# Altium footprint library WS-RSTV.PcbLib: 70 footprints (part 1 of 5)
Each footprint in its own frame and in the unit in brackets; x right, y up, seen from the top. Pads: shape width x height; smd on the part's side, far side on the other; paste and mask are expansions set on the pad; w line width, h text height; cw(c..) or ccw(c..) is an arc to the next point about the centre after c.
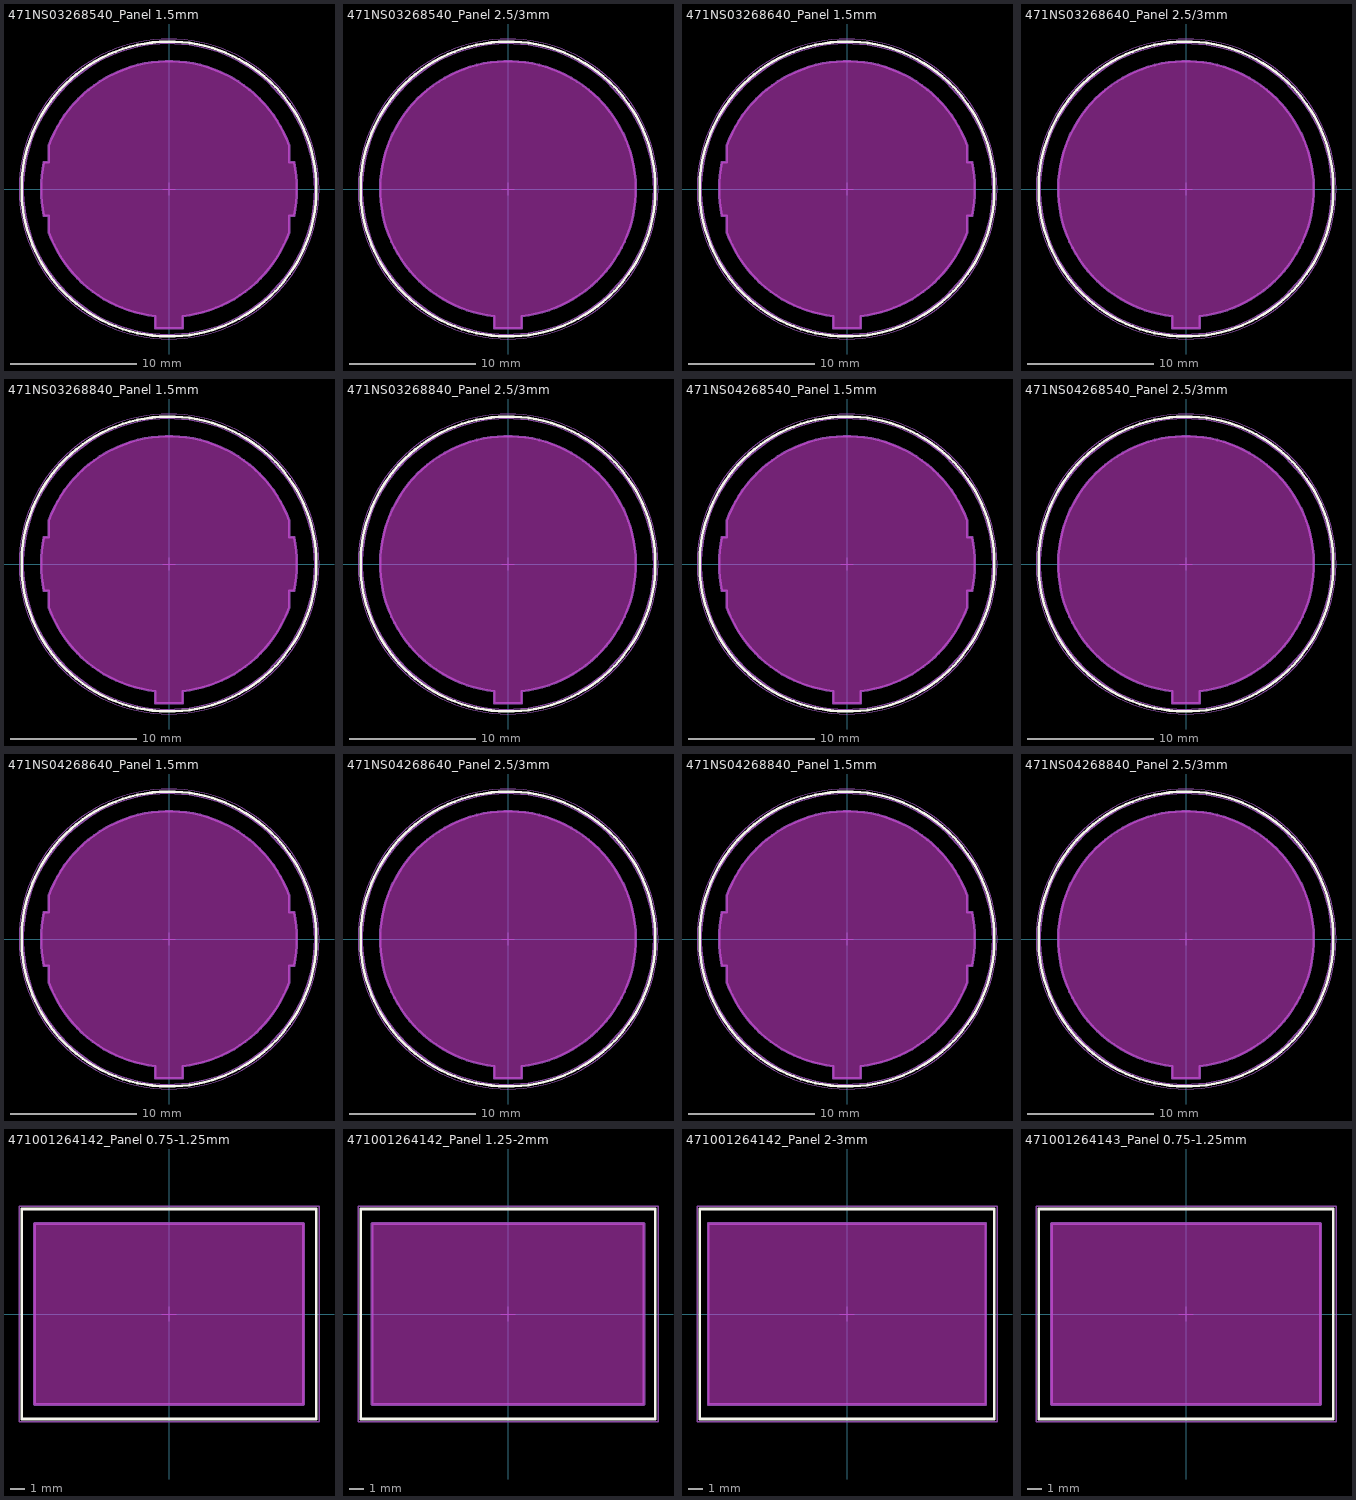
[diagram p0: the footprints below, top view; thin cyan lines are the x and y axes]

## 471NS03268540_Panel 1.5mm [mm]
height 5.5
Top Overlay:
  circle w0.2: c0,0 r11.65
Keep-Out Layer:
  board cut-out: -9.879,-2.1 -9.5,-2.1 -9.5,-3.43 -9.34,-3.872 -8.941,-4.722 -8.464,-5.531 -7.914,-6.293 -7.296,-7 -6.615,-7.647 -5.877,-8.228 -5.088,-8.737 -4.255,-9.172 -3.386,-9.527 -2.487,-9.8 -1.567,-9.989 -1.1,-10.04 -1.1,-11 1.1,-11 1.1,-10.04 1.567,-9.989 2.487,-9.8 3.386,-9.527 4.255,-9.172 5.088,-8.737 5.877,-8.228 6.615,-7.647 7.296,-7 7.914,-6.293 8.464,-5.531 8.941,-4.722 9.34,-3.872 9.5,-3.43 9.5,-2.1 9.879,-2.1 9.934,-1.841 10.017,-1.319 10.072,-0.793 10.1,-0.265 10.1,0.264 10.072,0.793 10.017,1.319 9.934,1.841 9.879,2.1 9.5,2.1 9.5,3.43 9.35,3.846 8.978,4.648 8.538,5.414 8.032,6.139 7.466,6.817 6.842,7.443 6.165,8.012 5.442,8.52 4.677,8.963 3.877,9.337 3.046,9.64 2.193,9.869 1.322,10.023 0.442,10.1 -0.442,10.1 -1.322,10.023 -2.193,9.869 -3.046,9.64 -3.876,9.337 -4.677,8.963 -5.442,8.52 -6.165,8.012 -6.842,7.443 -7.465,6.817 -8.032,6.139 -8.538,5.414 -8.978,4.648 -9.35,3.846 -9.5,3.43 -9.5,2.1 -9.879,2.1 -9.934,1.841 -10.017,1.319 -10.072,0.793 -10.1,0.264 -10.1,-0.265 -10.072,-0.793 -10.017,-1.319 -9.934,-1.841
Board Shape:
  lines w0.2: -9.879,2.1 ccw(c0,0) -9.879,-2.1 -9.5,-2.1 -9.5,-3.43 ccw(c0,0) -1.1,-10.04 -1.1,-11 1.1,-11 1.1,-10.04 ccw(c0,0) 9.5,-3.43 9.5,-2.1 9.879,-2.1 ccw(c0,0) 9.879,2.1 ; -9.879,2.1 -9.5,2.1 -9.5,3.43 cw(c0,0) 9.5,3.43 9.5,2.1 9.879,2.1
Assembly Notes:
  text "Panel Thicnkess 1.5mm" at -6,-13 h0.8
Top Component Outline:
  circle w0.1: c0,0 r11.5
Top Courtyard:
  circle w0.05: c0,0 r11.85
Top Component Center:
  lines w0.05: -0.5,0 0.5,0 ; 0,-0.5 0,0.5
Top Designator (Mech19):
  text ".Designator" at -7.498,-0.5 h1.5
3D body "471NS03268540.stp": height 5.7, standoff -22.6, extent -11.5,-11.497 11.5,11.497

## 471NS03268540_Panel 2.5/3mm [mm]
height 5.5
Top Overlay:
  circle w0.2: c0,0 r11.65
Keep-Out Layer:
  board cut-out: -1.1,-11 -1.1,-10.04 -1.576,-9.988 -2.514,-9.794 -3.429,-9.512 -4.314,-9.145 -5.16,-8.696 -5.96,-8.168 -6.706,-7.568 -7.392,-6.899 -8.012,-6.169 -8.559,-5.383 -9.03,-4.549 -9.42,-3.674 -9.726,-2.766 -9.944,-1.834 -10.073,-0.884 -10.111,0.073 -10.059,1.029 -9.916,1.976 -9.685,2.906 -9.366,3.809 -8.964,4.678 -8.481,5.505 -7.922,6.283 -7.292,7.005 -6.597,7.663 -5.842,8.253 -5.035,8.769 -4.182,9.206 -3.293,9.56 -2.373,9.829 -1.432,10.009 -0.479,10.1 0.479,10.1 1.432,10.009 2.373,9.829 3.293,9.56 4.182,9.206 5.035,8.769 5.842,8.253 6.597,7.663 7.292,7.005 7.922,6.283 8.481,5.505 8.964,4.678 9.366,3.809 9.685,2.906 9.916,1.976 10.059,1.029 10.111,0.073 10.073,-0.884 9.944,-1.834 9.726,-2.766 9.42,-3.674 9.03,-4.549 8.559,-5.383 8.012,-6.169 7.392,-6.899 6.706,-7.568 5.96,-8.168 5.16,-8.696 4.314,-9.145 3.43,-9.512 2.514,-9.794 1.576,-9.988 1.1,-10.04 1.1,-11
Board Shape:
  lines w0.2: -1.1,-11 1.1,-11 1.1,-10.04 ccw(c0,0) -1.1,-10.04 -1.1,-11
Assembly Notes:
  text "Panel Thicnkess 2.5/3mm" at -6,-13 h0.8
Top Component Outline:
  circle w0.1: c0,0 r11.5
Top Courtyard:
  circle w0.05: c0,0 r11.85
Top Component Center:
  lines w0.05: -0.5,0 0.5,0 ; 0,-0.5 0,0.5
Top Designator (Mech19):
  text ".Designator" at -7.498,-0.5 h1.5
3D body "471NS03268540.stp": height 5.7, standoff -22.6, extent -11.5,-11.497 11.5,11.497

## 471NS03268640_Panel 1.5mm [mm]
height 5.5
Top Overlay:
  circle w0.2: c0,0 r11.65
Keep-Out Layer:
  board cut-out: -9.879,-2.1 -9.5,-2.1 -9.5,-3.43 -9.34,-3.872 -8.941,-4.722 -8.464,-5.531 -7.914,-6.293 -7.296,-7 -6.615,-7.647 -5.877,-8.228 -5.088,-8.737 -4.255,-9.172 -3.386,-9.527 -2.487,-9.8 -1.567,-9.989 -1.1,-10.04 -1.1,-11 1.1,-11 1.1,-10.04 1.567,-9.989 2.487,-9.8 3.386,-9.527 4.255,-9.172 5.088,-8.737 5.877,-8.228 6.615,-7.647 7.296,-7 7.914,-6.293 8.464,-5.531 8.941,-4.722 9.34,-3.872 9.5,-3.43 9.5,-2.1 9.879,-2.1 9.934,-1.841 10.017,-1.319 10.072,-0.793 10.1,-0.265 10.1,0.264 10.072,0.793 10.017,1.319 9.934,1.841 9.879,2.1 9.5,2.1 9.5,3.43 9.35,3.846 8.978,4.648 8.538,5.414 8.032,6.139 7.466,6.817 6.842,7.443 6.165,8.012 5.442,8.52 4.677,8.963 3.877,9.337 3.046,9.64 2.193,9.869 1.322,10.023 0.442,10.1 -0.442,10.1 -1.322,10.023 -2.193,9.869 -3.046,9.64 -3.876,9.337 -4.677,8.963 -5.442,8.52 -6.165,8.012 -6.842,7.443 -7.465,6.817 -8.032,6.139 -8.538,5.414 -8.978,4.648 -9.35,3.846 -9.5,3.43 -9.5,2.1 -9.879,2.1 -9.934,1.841 -10.017,1.319 -10.072,0.793 -10.1,0.264 -10.1,-0.265 -10.072,-0.793 -10.017,-1.319 -9.934,-1.841
Board Shape:
  lines w0.2: -9.879,2.1 ccw(c0,0) -9.879,-2.1 -9.5,-2.1 -9.5,-3.43 ccw(c0,0) -1.1,-10.04 -1.1,-11 1.1,-11 1.1,-10.04 ccw(c0,0) 9.5,-3.43 9.5,-2.1 9.879,-2.1 ccw(c0,0) 9.879,2.1 ; -9.879,2.1 -9.5,2.1 -9.5,3.43 cw(c0,0) 9.5,3.43 9.5,2.1 9.879,2.1
Assembly Notes:
  text "Panel Thicnkess 1.5mm" at -6.347,-12.919 h0.8
Top Component Outline:
  circle w0.1: c0,0 r11.5
Top Courtyard:
  circle w0.05: c0,0 r11.85
Top Component Center:
  lines w0.05: -0.5,0 0.5,0 ; 0,-0.5 0,0.5
Top Designator (Mech19):
  text ".Designator" at -7.498,-0.5 h1.5
3D body "471NS03268640.stp": height 5.7, standoff -22.6, extent -11.5,-11.497 11.5,11.497

## 471NS03268640_Panel 2.5/3mm [mm]
height 5.5
Top Overlay:
  circle w0.2: c0,0 r11.65
Keep-Out Layer:
  board cut-out: -1.1,-11 -1.1,-10.04 -1.576,-9.988 -2.514,-9.794 -3.429,-9.512 -4.314,-9.145 -5.16,-8.696 -5.96,-8.168 -6.706,-7.568 -7.392,-6.899 -8.012,-6.169 -8.559,-5.383 -9.03,-4.549 -9.42,-3.674 -9.726,-2.766 -9.944,-1.834 -10.073,-0.884 -10.111,0.073 -10.059,1.029 -9.916,1.976 -9.685,2.906 -9.366,3.809 -8.964,4.678 -8.481,5.505 -7.922,6.283 -7.292,7.005 -6.597,7.663 -5.842,8.253 -5.035,8.769 -4.182,9.206 -3.293,9.56 -2.373,9.829 -1.432,10.009 -0.479,10.1 0.479,10.1 1.432,10.009 2.373,9.829 3.293,9.56 4.182,9.206 5.035,8.769 5.842,8.253 6.597,7.663 7.292,7.005 7.922,6.283 8.481,5.505 8.964,4.678 9.366,3.809 9.685,2.906 9.916,1.976 10.059,1.029 10.111,0.073 10.073,-0.884 9.944,-1.834 9.726,-2.766 9.42,-3.674 9.03,-4.549 8.559,-5.383 8.012,-6.169 7.392,-6.899 6.706,-7.568 5.96,-8.168 5.16,-8.696 4.314,-9.145 3.43,-9.512 2.514,-9.794 1.576,-9.988 1.1,-10.04 1.1,-11
Board Shape:
  lines w0.2: -1.1,-11 -1.1,-10.04 cw(c0,0) 1.1,-10.04 1.1,-11 -1.1,-11
Assembly Notes:
  text "Panel Thicnkess 2.5/3mm" at -7.059,-12.862 h0.8
Top Component Outline:
  circle w0.1: c0,0 r11.5
Top Courtyard:
  circle w0.05: c0,0 r11.85
Top Component Center:
  lines w0.05: -0.5,0 0.5,0 ; 0,-0.5 0,0.5
Top Designator (Mech19):
  text ".Designator" at -7.498,-0.5 h1.5
3D body "471NS03268640.stp": height 5.7, standoff -22.6, extent -11.5,-11.497 11.5,11.497

## 471NS03268840_Panel 1.5mm [mm]
height 5.5
Top Overlay:
  circle w0.2: c0,0 r11.65
Keep-Out Layer:
  board cut-out: -9.879,-2.1 -9.5,-2.1 -9.5,-3.43 -9.34,-3.872 -8.941,-4.722 -8.464,-5.531 -7.914,-6.293 -7.296,-7 -6.615,-7.647 -5.877,-8.228 -5.088,-8.737 -4.255,-9.172 -3.386,-9.527 -2.487,-9.8 -1.567,-9.989 -1.1,-10.04 -1.1,-11 1.1,-11 1.1,-10.04 1.567,-9.989 2.487,-9.8 3.386,-9.527 4.255,-9.172 5.088,-8.737 5.877,-8.228 6.615,-7.647 7.296,-7 7.914,-6.293 8.464,-5.531 8.941,-4.722 9.34,-3.872 9.5,-3.43 9.5,-2.1 9.879,-2.1 9.934,-1.841 10.017,-1.319 10.072,-0.793 10.1,-0.265 10.1,0.264 10.072,0.793 10.017,1.319 9.934,1.841 9.879,2.1 9.5,2.1 9.5,3.43 9.35,3.846 8.978,4.648 8.538,5.414 8.032,6.139 7.466,6.817 6.842,7.443 6.165,8.012 5.442,8.52 4.677,8.963 3.877,9.337 3.046,9.64 2.193,9.869 1.322,10.023 0.442,10.1 -0.442,10.1 -1.322,10.023 -2.193,9.869 -3.046,9.64 -3.876,9.337 -4.677,8.963 -5.442,8.52 -6.165,8.012 -6.842,7.443 -7.465,6.817 -8.032,6.139 -8.538,5.414 -8.978,4.648 -9.35,3.846 -9.5,3.43 -9.5,2.1 -9.879,2.1 -9.934,1.841 -10.017,1.319 -10.072,0.793 -10.1,0.264 -10.1,-0.265 -10.072,-0.793 -10.017,-1.319 -9.934,-1.841
Board Shape:
  lines w0.2: -9.879,2.1 ccw(c0,0) -9.879,-2.1 -9.5,-2.1 -9.5,-3.43 ccw(c0,0) -1.1,-10.04 -1.1,-11 1.1,-11 1.1,-10.04 ccw(c0,0) 9.5,-3.43 9.5,-2.1 9.879,-2.1 ccw(c0,0) 9.879,2.1 ; -9.879,2.1 -9.5,2.1 -9.5,3.43 cw(c0,0) 9.5,3.43 9.5,2.1 9.879,2.1
Assembly Notes:
  text "Panel Thicnkess 1.5mm" at -6.347,-12.919 h0.8
Top Component Outline:
  circle w0.1: c0,0 r11.5
Top Courtyard:
  circle w0.05: c0,0 r11.85
Top Component Center:
  lines w0.05: -0.5,0 0.5,0 ; 0,-0.5 0,0.5
Top Designator (Mech19):
  text ".Designator" at -7.498,-0.5 h1.5
3D body "471NS03268840.stp": height 5.7, standoff -22.6, extent -11.5,-11.497 11.5,11.497

## 471NS03268840_Panel 2.5/3mm [mm]
height 5.5
Top Overlay:
  circle w0.2: c0,0 r11.65
Keep-Out Layer:
  board cut-out: -1.1,-11 -1.1,-10.04 -1.576,-9.988 -2.514,-9.794 -3.429,-9.512 -4.314,-9.145 -5.16,-8.696 -5.96,-8.168 -6.706,-7.568 -7.392,-6.899 -8.012,-6.169 -8.559,-5.383 -9.03,-4.549 -9.42,-3.674 -9.726,-2.766 -9.944,-1.834 -10.073,-0.884 -10.111,0.073 -10.059,1.029 -9.916,1.976 -9.685,2.906 -9.366,3.809 -8.964,4.678 -8.481,5.505 -7.922,6.283 -7.292,7.005 -6.597,7.663 -5.842,8.253 -5.035,8.769 -4.182,9.206 -3.293,9.56 -2.373,9.829 -1.432,10.009 -0.479,10.1 0.479,10.1 1.432,10.009 2.373,9.829 3.293,9.56 4.182,9.206 5.035,8.769 5.842,8.253 6.597,7.663 7.292,7.005 7.922,6.283 8.481,5.505 8.964,4.678 9.366,3.809 9.685,2.906 9.916,1.976 10.059,1.029 10.111,0.073 10.073,-0.884 9.944,-1.834 9.726,-2.766 9.42,-3.674 9.03,-4.549 8.559,-5.383 8.012,-6.169 7.392,-6.899 6.706,-7.568 5.96,-8.168 5.16,-8.696 4.314,-9.145 3.43,-9.512 2.514,-9.794 1.576,-9.988 1.1,-10.04 1.1,-11
Board Shape:
  lines w0.2: -1.1,-11 -1.1,-10.04 cw(c0,0) 1.1,-10.04 1.1,-11 -1.1,-11
Assembly Notes:
  text "Panel Thicnkess 2.5/3mm" at -7.059,-12.862 h0.8
Top Component Outline:
  circle w0.1: c0,0 r11.5
Top Courtyard:
  circle w0.05: c0,0 r11.85
Top Component Center:
  lines w0.05: -0.5,0 0.5,0 ; 0,-0.5 0,0.5
Top Designator (Mech19):
  text ".Designator" at -7.498,-0.5 h1.5
3D body "471NS03268840.stp": height 5.7, standoff -22.6, extent -11.5,-11.497 11.5,11.497

## 471NS04268540_Panel 1.5mm [mm]
height 5.5
Top Overlay:
  circle w0.2: c0,0 r11.65
Keep-Out Layer:
  board cut-out: -9.879,-2.1 -9.5,-2.1 -9.5,-3.43 -9.34,-3.872 -8.941,-4.722 -8.464,-5.531 -7.914,-6.293 -7.296,-7 -6.615,-7.647 -5.877,-8.228 -5.088,-8.737 -4.255,-9.172 -3.386,-9.527 -2.487,-9.8 -1.567,-9.989 -1.1,-10.04 -1.1,-11 1.1,-11 1.1,-10.04 1.567,-9.989 2.487,-9.8 3.386,-9.527 4.255,-9.172 5.088,-8.737 5.877,-8.228 6.615,-7.647 7.296,-7 7.914,-6.293 8.464,-5.531 8.941,-4.722 9.34,-3.872 9.5,-3.43 9.5,-2.1 9.879,-2.1 9.934,-1.841 10.017,-1.319 10.072,-0.793 10.1,-0.265 10.1,0.264 10.072,0.793 10.017,1.319 9.934,1.841 9.879,2.1 9.5,2.1 9.5,3.43 9.35,3.846 8.978,4.648 8.538,5.414 8.032,6.139 7.466,6.817 6.842,7.443 6.165,8.012 5.442,8.52 4.677,8.963 3.877,9.337 3.046,9.64 2.193,9.869 1.322,10.023 0.442,10.1 -0.442,10.1 -1.322,10.023 -2.193,9.869 -3.046,9.64 -3.876,9.337 -4.677,8.963 -5.442,8.52 -6.165,8.012 -6.842,7.443 -7.465,6.817 -8.032,6.139 -8.538,5.414 -8.978,4.648 -9.35,3.846 -9.5,3.43 -9.5,2.1 -9.879,2.1 -9.934,1.841 -10.017,1.319 -10.072,0.793 -10.1,0.264 -10.1,-0.265 -10.072,-0.793 -10.017,-1.319 -9.934,-1.841
Board Shape:
  lines w0.2: -9.879,2.1 ccw(c0,0) -9.879,-2.1 -9.5,-2.1 -9.5,-3.43 ccw(c0,0) -1.1,-10.04 -1.1,-11 1.1,-11 1.1,-10.04 ccw(c0,0) 9.5,-3.43 9.5,-2.1 9.879,-2.1 ccw(c0,0) 9.879,2.1 ; -9.879,2.1 -9.5,2.1 -9.5,3.43 cw(c0,0) 9.5,3.43 9.5,2.1 9.879,2.1
Assembly Notes:
  text "Panel Thicnkess 1.5mm" at -6.347,-12.919 h0.8
Top Component Outline:
  circle w0.1: c0,0 r11.5
Top Courtyard:
  circle w0.05: c0,0 r11.85
Top Component Center:
  lines w0.05: -0.5,0 0.5,0 ; 0,-0.5 0,0.5
Top Designator (Mech19):
  text ".Designator" at -7.498,-0.5 h1.5
3D body "471NS04268540.stp": height 5.7, standoff -22.6, extent -11.5,-11.497 11.5,11.497

## 471NS04268540_Panel 2.5/3mm [mm]
height 5.5
Top Overlay:
  circle w0.2: c0,0 r11.65
Keep-Out Layer:
  board cut-out: -1.1,-11 -1.1,-10.04 -1.576,-9.988 -2.514,-9.794 -3.429,-9.512 -4.314,-9.145 -5.16,-8.696 -5.96,-8.168 -6.706,-7.568 -7.392,-6.899 -8.012,-6.169 -8.559,-5.383 -9.03,-4.549 -9.42,-3.674 -9.726,-2.766 -9.944,-1.834 -10.073,-0.884 -10.111,0.073 -10.059,1.029 -9.916,1.976 -9.685,2.906 -9.366,3.809 -8.964,4.678 -8.481,5.505 -7.922,6.283 -7.292,7.005 -6.597,7.663 -5.842,8.253 -5.035,8.769 -4.182,9.206 -3.293,9.56 -2.373,9.829 -1.432,10.009 -0.479,10.1 0.479,10.1 1.432,10.009 2.373,9.829 3.293,9.56 4.182,9.206 5.035,8.769 5.842,8.253 6.597,7.663 7.292,7.005 7.922,6.283 8.481,5.505 8.964,4.678 9.366,3.809 9.685,2.906 9.916,1.976 10.059,1.029 10.111,0.073 10.073,-0.884 9.944,-1.834 9.726,-2.766 9.42,-3.674 9.03,-4.549 8.559,-5.383 8.012,-6.169 7.392,-6.899 6.706,-7.568 5.96,-8.168 5.16,-8.696 4.314,-9.145 3.43,-9.512 2.514,-9.794 1.576,-9.988 1.1,-10.04 1.1,-11
Board Shape:
  lines w0.2: -1.1,-11 1.1,-11 1.1,-10.04 ccw(c0,0) -1.1,-10.04 -1.1,-11
Assembly Notes:
  text "Panel Thicnkess 2.5/3mm" at -7.059,-12.862 h0.8
Top Component Outline:
  circle w0.1: c0,0 r11.5
Top Courtyard:
  circle w0.05: c0,0 r11.85
Top Component Center:
  lines w0.05: -0.5,0 0.5,0 ; 0,-0.5 0,0.5
Top Designator (Mech19):
  text ".Designator" at -7.498,-0.5 h1.5
3D body "471NS04268540.stp": height 5.7, standoff -22.6, extent -11.5,-11.497 11.5,11.497

## 471NS04268640_Panel 1.5mm [mm]
height 5.5
Top Overlay:
  circle w0.2: c0,0 r11.65
Keep-Out Layer:
  board cut-out: -9.879,-2.1 -9.5,-2.1 -9.5,-3.43 -9.34,-3.872 -8.941,-4.722 -8.464,-5.531 -7.914,-6.293 -7.296,-7 -6.615,-7.647 -5.877,-8.228 -5.088,-8.737 -4.255,-9.172 -3.386,-9.527 -2.487,-9.8 -1.567,-9.989 -1.1,-10.04 -1.1,-11 1.1,-11 1.1,-10.04 1.567,-9.989 2.487,-9.8 3.386,-9.527 4.255,-9.172 5.088,-8.737 5.877,-8.228 6.615,-7.647 7.296,-7 7.914,-6.293 8.464,-5.531 8.941,-4.722 9.34,-3.872 9.5,-3.43 9.5,-2.1 9.879,-2.1 9.934,-1.841 10.017,-1.319 10.072,-0.793 10.1,-0.265 10.1,0.264 10.072,0.793 10.017,1.319 9.934,1.841 9.879,2.1 9.5,2.1 9.5,3.43 9.35,3.846 8.978,4.648 8.538,5.414 8.032,6.139 7.466,6.817 6.842,7.443 6.165,8.012 5.442,8.52 4.677,8.963 3.877,9.337 3.046,9.64 2.193,9.869 1.322,10.023 0.442,10.1 -0.442,10.1 -1.322,10.023 -2.193,9.869 -3.046,9.64 -3.876,9.337 -4.677,8.963 -5.442,8.52 -6.165,8.012 -6.842,7.443 -7.465,6.817 -8.032,6.139 -8.538,5.414 -8.978,4.648 -9.35,3.846 -9.5,3.43 -9.5,2.1 -9.879,2.1 -9.934,1.841 -10.017,1.319 -10.072,0.793 -10.1,0.264 -10.1,-0.265 -10.072,-0.793 -10.017,-1.319 -9.934,-1.841
Board Shape:
  lines w0.2: -9.879,2.1 ccw(c0,0) -9.879,-2.1 -9.5,-2.1 -9.5,-3.43 ccw(c0,0) -1.1,-10.04 -1.1,-11 1.1,-11 1.1,-10.04 ccw(c0,0) 9.5,-3.43 9.5,-2.1 9.879,-2.1 ccw(c0,0) 9.879,2.1 ; -9.879,2.1 -9.5,2.1 -9.5,3.43 cw(c0,0) 9.5,3.43 9.5,2.1 9.879,2.1
Assembly Notes:
  text "Panel Thicnkess 1.5mm" at -6.347,-12.919 h0.8
Top Component Outline:
  circle w0.1: c0,0 r11.5
Top Courtyard:
  circle w0.05: c0,0 r11.85
Top Component Center:
  lines w0.05: -0.5,0 0.5,0 ; 0,-0.5 0,0.5
Top Designator (Mech19):
  text ".Designator" at -7.498,-0.5 h1.5
3D body "471NS04268640.stp": height 5.7, standoff -22.6, extent -11.5,-11.497 11.5,11.497

## 471NS04268640_Panel 2.5/3mm [mm]
height 5.5
Top Overlay:
  circle w0.2: c0,0 r11.65
Keep-Out Layer:
  board cut-out: -1.1,-11 -1.1,-10.04 -1.576,-9.988 -2.514,-9.794 -3.429,-9.512 -4.314,-9.145 -5.16,-8.696 -5.96,-8.168 -6.706,-7.568 -7.392,-6.899 -8.012,-6.169 -8.559,-5.383 -9.03,-4.549 -9.42,-3.674 -9.726,-2.766 -9.944,-1.834 -10.073,-0.884 -10.111,0.073 -10.059,1.029 -9.916,1.976 -9.685,2.906 -9.366,3.809 -8.964,4.678 -8.481,5.505 -7.922,6.283 -7.292,7.005 -6.597,7.663 -5.842,8.253 -5.035,8.769 -4.182,9.206 -3.293,9.56 -2.373,9.829 -1.432,10.009 -0.479,10.1 0.479,10.1 1.432,10.009 2.373,9.829 3.293,9.56 4.182,9.206 5.035,8.769 5.842,8.253 6.597,7.663 7.292,7.005 7.922,6.283 8.481,5.505 8.964,4.678 9.366,3.809 9.685,2.906 9.916,1.976 10.059,1.029 10.111,0.073 10.073,-0.884 9.944,-1.834 9.726,-2.766 9.42,-3.674 9.03,-4.549 8.559,-5.383 8.012,-6.169 7.392,-6.899 6.706,-7.568 5.96,-8.168 5.16,-8.696 4.314,-9.145 3.43,-9.512 2.514,-9.794 1.576,-9.988 1.1,-10.04 1.1,-11
Board Shape:
  lines w0.2: -1.1,-11 -1.1,-10.04 cw(c0,0) 1.1,-10.04 1.1,-11 -1.1,-11
Assembly Notes:
  text "Panel Thicnkess 2.5/3mm" at -7.059,-12.862 h0.8
Top Component Outline:
  circle w0.1: c0,0 r11.5
Top Courtyard:
  circle w0.05: c0,0 r11.85
Top Component Center:
  lines w0.05: -0.5,0 0.5,0 ; 0,-0.5 0,0.5
Top Designator (Mech19):
  text ".Designator" at -7.498,-0.5 h1.5
3D body "471NS04268640.stp": height 5.7, standoff -22.6, extent -11.5,-11.497 11.5,11.497

## 471NS04268840_Panel 1.5mm [mm]
height 5.5
Top Overlay:
  circle w0.2: c0,0 r11.65
Keep-Out Layer:
  board cut-out: -9.879,-2.1 -9.5,-2.1 -9.5,-3.43 -9.34,-3.872 -8.941,-4.722 -8.464,-5.531 -7.914,-6.293 -7.296,-7 -6.615,-7.647 -5.877,-8.228 -5.088,-8.737 -4.255,-9.172 -3.386,-9.527 -2.487,-9.8 -1.567,-9.989 -1.1,-10.04 -1.1,-11 1.1,-11 1.1,-10.04 1.567,-9.989 2.487,-9.8 3.386,-9.527 4.255,-9.172 5.088,-8.737 5.877,-8.228 6.615,-7.647 7.296,-7 7.914,-6.293 8.464,-5.531 8.941,-4.722 9.34,-3.872 9.5,-3.43 9.5,-2.1 9.879,-2.1 9.934,-1.841 10.017,-1.319 10.072,-0.793 10.1,-0.265 10.1,0.264 10.072,0.793 10.017,1.319 9.934,1.841 9.879,2.1 9.5,2.1 9.5,3.43 9.35,3.846 8.978,4.648 8.538,5.414 8.032,6.139 7.466,6.817 6.842,7.443 6.165,8.012 5.442,8.52 4.677,8.963 3.877,9.337 3.046,9.64 2.193,9.869 1.322,10.023 0.442,10.1 -0.442,10.1 -1.322,10.023 -2.193,9.869 -3.046,9.64 -3.876,9.337 -4.677,8.963 -5.442,8.52 -6.165,8.012 -6.842,7.443 -7.465,6.817 -8.032,6.139 -8.538,5.414 -8.978,4.648 -9.35,3.846 -9.5,3.43 -9.5,2.1 -9.879,2.1 -9.934,1.841 -10.017,1.319 -10.072,0.793 -10.1,0.264 -10.1,-0.265 -10.072,-0.793 -10.017,-1.319 -9.934,-1.841
Board Shape:
  lines w0.2: -9.879,2.1 ccw(c0,0) -9.879,-2.1 -9.5,-2.1 -9.5,-3.43 ccw(c0,0) -1.1,-10.04 -1.1,-11 1.1,-11 1.1,-10.04 ccw(c0,0) 9.5,-3.43 9.5,-2.1 9.879,-2.1 ccw(c0,0) 9.879,2.1 ; -9.879,2.1 -9.5,2.1 -9.5,3.43 cw(c0,0) 9.5,3.43 9.5,2.1 9.879,2.1
Assembly Notes:
  text "Panel Thicnkess 1.5mm" at -6.347,-12.919 h0.8
Top Component Outline:
  circle w0.1: c0,0 r11.5
Top Courtyard:
  circle w0.05: c0,0 r11.85
Top Component Center:
  lines w0.05: -0.5,0 0.5,0 ; 0,-0.5 0,0.5
Top Designator (Mech19):
  text ".Designator" at -7.498,-0.5 h1.5
3D body "471NS04268840.stp": height 5.7, standoff -22.6, extent -11.5,-11.497 11.5,11.497

## 471NS04268840_Panel 2.5/3mm [mm]
height 5.5
Top Overlay:
  circle w0.2: c0,0 r11.65
Keep-Out Layer:
  board cut-out: -1.1,-11 -1.1,-10.04 -1.576,-9.988 -2.514,-9.794 -3.429,-9.512 -4.314,-9.145 -5.16,-8.696 -5.96,-8.168 -6.706,-7.568 -7.392,-6.899 -8.012,-6.169 -8.559,-5.383 -9.03,-4.549 -9.42,-3.674 -9.726,-2.766 -9.944,-1.834 -10.073,-0.884 -10.111,0.073 -10.059,1.029 -9.916,1.976 -9.685,2.906 -9.366,3.809 -8.964,4.678 -8.481,5.505 -7.922,6.283 -7.292,7.005 -6.597,7.663 -5.842,8.253 -5.035,8.769 -4.182,9.206 -3.293,9.56 -2.373,9.829 -1.432,10.009 -0.479,10.1 0.479,10.1 1.432,10.009 2.373,9.829 3.293,9.56 4.182,9.206 5.035,8.769 5.842,8.253 6.597,7.663 7.292,7.005 7.922,6.283 8.481,5.505 8.964,4.678 9.366,3.809 9.685,2.906 9.916,1.976 10.059,1.029 10.111,0.073 10.073,-0.884 9.944,-1.834 9.726,-2.766 9.42,-3.674 9.03,-4.549 8.559,-5.383 8.012,-6.169 7.392,-6.899 6.706,-7.568 5.96,-8.168 5.16,-8.696 4.314,-9.145 3.43,-9.512 2.514,-9.794 1.576,-9.988 1.1,-10.04 1.1,-11
Board Shape:
  lines w0.2: -1.1,-11 -1.1,-10.04 cw(c0,0) 1.1,-10.04 1.1,-11 -1.1,-11
Assembly Notes:
  text "Panel Thicnkess 2.5/3mm" at -7.059,-12.862 h0.8
Top Component Outline:
  circle w0.1: c0,0 r11.5
Top Courtyard:
  circle w0.05: c0,0 r11.85
Top Component Center:
  lines w0.05: -0.5,0 0.5,0 ; 0,-0.5 0,0.5
Top Designator (Mech19):
  text ".Designator" at -7.498,-0.5 h1.5
3D body "471NS04268840.stp": height 5.7, standoff -22.6, extent -11.5,-11.497 11.5,11.497

## 471001264142_Panel 0.75-1.25mm [mm] "19.2 x 12.9 mm panel Cut-out with 0.187” quick connect terminal Rocker Switch, SPST"
height 22.5
Top Overlay:
  lines w0.2: -10.5,-7.5 -10.5,7.5 10.5,7.5 10.5,-7.5 -10.5,-7.5
Keep-Out Layer:
  board cut-out: -9.6,-6.45 -9.6,6.45 9.6,6.45 9.6,-6.45
Board Shape:
  lines w0.2: -9.6,-6.45 -9.6,6.45 9.6,6.45 9.6,-6.45 -9.6,-6.45
Assembly Notes:
  text "Apply for Panel Thickness 0.75-1.25mm" at -11.323,-8.628 h0.81
Top Component Outline:
  lines w0.1: -10.5,-7.5 -10.5,7.5 10.5,7.5 10.5,-7.5 -10.5,-7.5
Top Courtyard:
  lines w0.1: -10.7,-7.7 10.7,-7.7 10.7,7.7 -10.7,7.7 -10.7,-7.7
Top Component Center:
  lines w0.05: -0.5,0 0.5,0 ; 0,-0.5 0,0.5
Top Designator (Mech19):
  text ".Designator" at -7.498,-0.5 h1.5
3D body "471001264142.stp": height 5.86, standoff -21.65, extent -10.6,-7.5 10.6,7.5

## 471001264142_Panel 1.25-2mm [mm] "19.2 x 12.9 mm panel Cut-out with 0.187” quick connect terminal Rocker Switch, SPST"
height 22.5
Top Overlay:
  lines w0.2: -10.5,-7.5 -10.5,7.5 10.5,7.5 10.5,-7.5 -10.5,-7.5
Keep-Out Layer:
  board cut-out: -9.7,-6.45 -9.7,6.45 9.7,6.45 9.7,-6.45
Board Shape:
  lines w0.2: -9.7,-6.45 -9.7,6.45 9.7,6.45 9.7,-6.45 -9.7,-6.45
Assembly Notes:
  text "Apply for Panel Thickness 1.25-2mm" at -9.971,-8.628 h0.81
Top Component Outline:
  lines w0.1: -10.5,-7.5 -10.5,7.5 10.5,7.5 10.5,-7.5 -10.5,-7.5
Top Courtyard:
  lines w0.1: -10.7,-7.7 10.7,-7.7 10.7,7.7 -10.7,7.7 -10.7,-7.7
Top Component Center:
  lines w0.05: -0.5,0 0.5,0 ; 0,-0.5 0,0.5
Top Designator (Mech19):
  text ".Designator" at -7.498,-0.5 h1.5
3D body "471001264142.stp": height 5.86, standoff -21.65, extent -10.6,-7.5 10.6,7.5

## 471001264142_Panel 2-3mm [mm] "19.2 x 12.9 mm panel Cut-out with 0.187” quick connect terminal Rocker Switch, SPST"
height 22.5
Top Overlay:
  lines w0.2: -10.5,-7.5 10.5,-7.5 10.5,7.5 -10.5,7.5 -10.5,-7.5
Keep-Out Layer:
  board cut-out: -9.9,-6.45 -9.9,6.45 9.9,6.45 9.9,-6.45
Board Shape:
  lines w0.2: -9.9,-6.45 9.9,-6.45 9.9,6.45 -9.9,6.45 -9.9,-6.45
Assembly Notes:
  text "Apply for Panel Thickness 2-3mm" at -9.684,-8.628 h0.81
Top Component Outline:
  lines w0.1: -10.5,-7.5 10.5,-7.5 10.5,7.5 -10.5,7.5 -10.5,-7.5
Top Courtyard:
  lines w0.1: -10.7,-7.7 -10.7,7.7 10.7,7.7 10.7,-7.7 -10.7,-7.7
Top Component Center:
  lines w0.05: -0.5,0 0.5,0 ; 0,-0.5 0,0.5
Top Designator (Mech19):
  text ".Designator" at -7.498,-0.5 h1.5
3D body "471001264142.stp": height 5.86, standoff -21.65, extent -10.6,-7.5 10.6,7.5

## 471001264143_Panel 0.75-1.25mm [mm] "19.2 x 12.9 mm panel Cut-out with  0.187” quick connect terminal  Rocker Switch"
height 22.5
Top Overlay:
  lines w0.2: -10.5,-7.5 10.5,-7.5 10.5,7.5 -10.5,7.5 -10.5,-7.5
Keep-Out Layer:
  board cut-out: -9.6,-6.45 -9.6,6.45 9.6,6.45 9.6,-6.45
Board Shape:
  lines w0.2: -9.6,-6.45 9.6,-6.45 9.6,6.45 -9.6,6.45 -9.6,-6.45
Assembly Notes:
  text "Apply for Panel Thickness 0.75-1.25mm" at -11.323,-8.628 h0.81
Top Component Outline:
  lines w0.1: -10.5,-7.5 10.5,-7.5 10.5,7.5 -10.5,7.5 -10.5,-7.5
Top Courtyard:
  lines w0.1: -10.7,-7.7 -10.7,7.7 10.7,7.7 10.7,-7.7 -10.7,-7.7
Top Component Center:
  lines w0.05: -0.5,0 0.5,0 ; 0,-0.5 0,0.5
Top Designator (Mech19):
  text ".Designator" at -7.498,-0.5 h1.5
3D body "471001264143.stp": height 5.86, standoff -21.65, extent -10.6,-7.5 10.6,7.5